# Altium footprint library QNCT03L.PcbLib: 1 footprints
Each footprint in its own frame and in the unit in brackets; x right, y up, seen from the top. Pads: shape width x height; smd on the part's side, far side on the other; paste and mask are expansions set on the pad; w line width, h text height; cw(c..) or ccw(c..) is an arc to the next point about the centre after c.
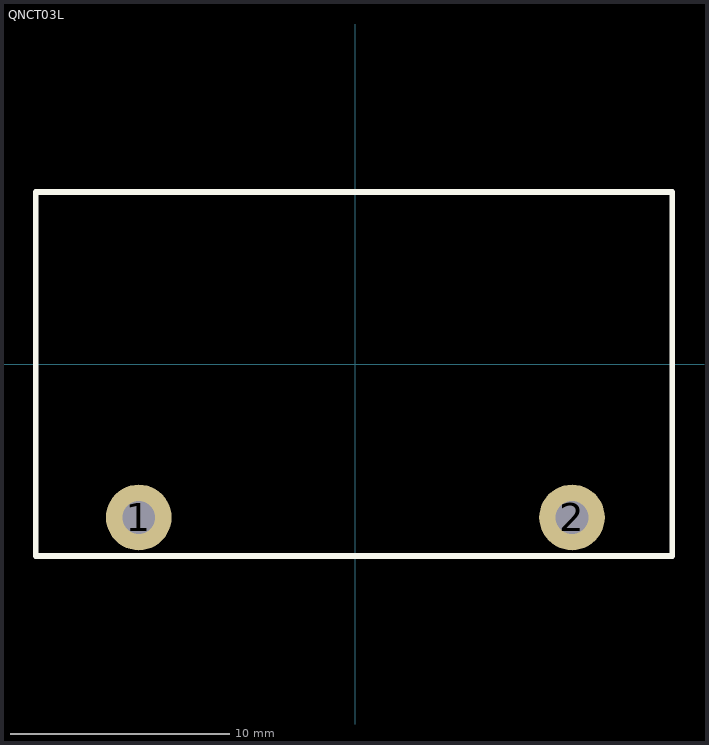
[diagram p0: the footprint, top view; thin cyan lines are the x and y axes]

## QNCT03L [mm] "Current Transformer QNCT03L"
pads (2):
  round 3 hole 1.5: 1(-9.9,-7) 2(9.9,-7)
Top Overlay:
  lines w0.254: -14.605,-8.763 14.478,-8.763 14.478,7.874 -14.605,7.874 -14.605,-8.763
3D body "DL-CT10CL-4000-1.STEP": height 29.13, standoff -4, extent -14.4,-7.7 14.4,7.7